# Altium footprint library CustomCase.PcbLib: 411 footprints (part 3 of 26)
Each footprint in its own frame and in the unit in brackets; x right, y up, seen from the top. Pads: shape width x height; smd on the part's side, far side on the other; paste and mask are expansions set on the pad; w line width, h text height; cw(c..) or ccw(c..) is an arc to the next point about the centre after c.
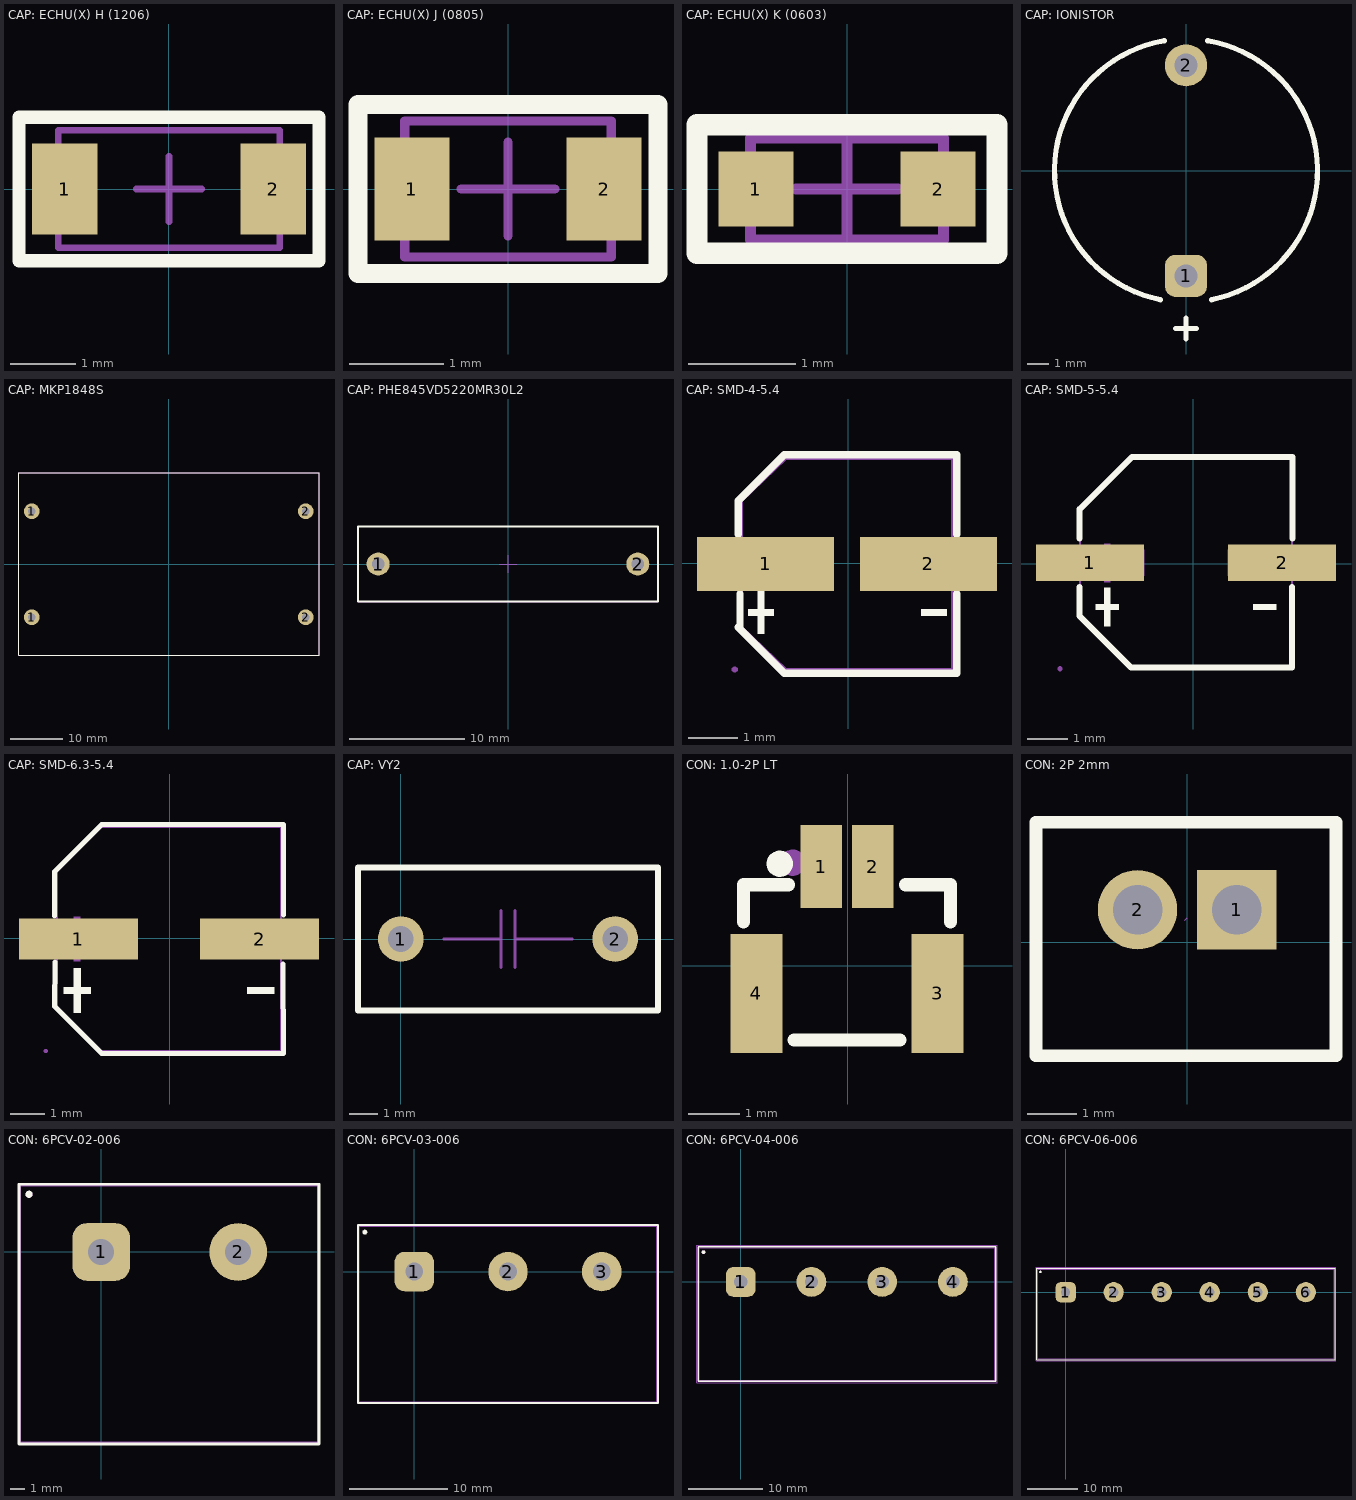
[diagram p2: the footprints below, top view; thin cyan lines are the x and y axes]

## CAP: ECHU(X) H (1206) [mm]
height 1.5
pads (2):
  rect 1x1.4 smd: 1(-1.6,0) 2(1.6,0)
Top Overlay:
  lines w0.2: -2.3,-1.1 -2.3,1.1 2.3,1.1 2.3,-1.1 -2.3,-1.1
Top Assy:
  lines w0.1: -1.7,-0.9 -1.7,0.9 1.7,0.9 1.7,-0.9 -1.7,-0.9
Size Area:
  lines w0.1: -0.5,0 0.5,0 ; 0,-0.5 0,0.5 ; -2.3,-1.1 -2.3,1.1 2.3,1.1 2.3,-1.1 -2.3,-1.1
3D body: height 1.5, standoff 0, extent -1.05,-0.9 1.05,0.9
3D body: height 1.5, standoff 0, extent -1.7,-0.9 -1.05,0.9
3D body: height 1.5, standoff 0, extent 1.05,-0.9 1.7,0.9

## CAP: ECHU(X) J (0805) [mm]
height 1.1
pads (2):
  rect 0.8x1.1 smd: 1(-1.025,0) 2(1.025,0)
Top Overlay:
  lines w0.2: -1.6,-0.9 -1.6,0.9 1.6,0.9 1.6,-0.9 -1.6,-0.9
Top Assy:
  lines w0.1: -1.1,-0.725 1.1,-0.725 1.1,0.725 -1.1,0.725 -1.1,-0.725
Size Area:
  lines w0.1: -0.5,0 0.5,0 ; 0,-0.5 0,0.5 ; -1.6,-0.9 1.6,-0.9 1.6,0.9 -1.6,0.9 -1.6,-0.9
3D body: height 1.1, standoff 0, extent 0.67,-0.725 1.1,0.725
3D body: height 1.1, standoff 0, extent -1.1,-0.725 -0.67,0.725
3D body: height 1.1, standoff 0, extent -0.67,-0.725 0.67,0.725

## CAP: ECHU(X) K (0603) [mm]
height 0.7
pads (2):
  rect 0.7x0.7 smd: 1(-0.85,0) 2(0.85,0)
Top Overlay:
  lines w0.2: -1.4,-0.6 1.4,-0.6 1.4,0.6 -1.4,0.6 -1.4,-0.6
Top Assy:
  lines w0.1: -0.9,-0.475 -0.9,0.475 0.9,0.475 0.9,-0.475 -0.9,-0.475
Size Area:
  lines w0.1: -0.475,0 0.475,0 ; 0,-0.475 0,0.475 ; -1.4,-0.6 -1.4,0.6 1.4,0.6 1.4,-0.6 -1.4,-0.6
3D body: height 0.7, standoff 0, extent -0.55,-0.475 0.55,0.475
3D body: height 0.7, standoff 0, extent -0.9,-0.475 -0.55,0.475
3D body: height 0.7, standoff 0, extent 0.55,-0.475 0.9,0.475

## CAP: IONISTOR [mm]
pads (2):
  rrect50% 2x2 hole 1.1: 1(0,-5)
  round 2 hole 1.1: 2(0,5)
Top Overlay:
  lines w0.25: -1.206,-6.132 cw(c0,0) -1.027,6.165 ; -0.5,-7.5 0.5,-7.5 ; 0,-8 0,-7 ; 1.027,6.165 cw(c0,0) 1.206,-6.132
3D body "eecs0hd334h.STEP": height 5.42, standoff -1.07, extent -5.25,-5.25 5.25,5.711

## CAP: MKP1848S [mm]
pads (4):
  round 3 hole 1.4: 1(-26.3,-10.2) 1(-26.3,10.1) 2(26.2,-10.2) 2(26.2,10.1)
Top Overlay:
  lines w0.2: -28.75,-17.5 28.75,-17.5 28.75,17.5 -28.75,17.5 -28.75,-17.5
Top Assy:
  lines w0.1: -28.75,-17.5 28.75,-17.5 28.75,17.5 -28.75,17.5 -28.75,-17.5
Size Area:
  lines w0.1: -28.75,-17.5 28.75,-17.5 28.75,17.5 -28.75,17.5 -28.75,-17.5
3D body "mkp18film.STEP": height 18.2, standoff -5.8, extent -28.75,-17.5 28.75,17.5

## CAP: PHE845VD5220MR30L2 [mm]
pads (2):
  round 2 hole 1.1: 1(-11.25,-0.003) 2(11.25,-0.003)
Top Overlay:
  lines w0.2: -13,-3.253 -13,3.253 13,3.253 13,-3.253 -13,-3.253
Top Assy:
  lines w0.1: -13,-3.253 13,-3.253 13,3.253 -13,3.253 -13,-3.253
Size Area:
  lines w0.1: -0.75,-0.003 0.75,-0.003 ; 0,-0.75 0,0.75 ; -13,-3.253 13,-3.253 13,3.253 -13,3.253 -13,-3.253
3D body "���.STEP": height 14.55, standoff -3.95, extent -13,-3.253 13,3.253

## CAP: SMD-4-5.4 [mm]
pads (2):
  rect 2.8x1.1 smd paste+0 mask+0.051: 1(-1.683,-0.011) 2(1.638,-0.011)
Top Overlay:
  region: 2.008,-0.936 2.008,-1.065 1.492,-1.065 1.492,-0.936
  region: -2.034,-0.936 -2.034,-1.065 -1.518,-1.065 -1.518,-0.936
  region: -1.84,-0.57 -1.84,-1.43 -1.711,-1.43 -1.711,-0.57
  lines w0.152: -2.239,-1.301 -1.303,-2.237 2.214,-2.237 2.214,-0.619 ; -2.239,0.596 -2.239,1.279 -1.303,2.215 2.214,2.215 2.214,0.596 ; -2.205,-1.301 -2.205,-0.619
Mechanical 6:
  region: 2.008,0.053 2.008,-0.076 1.492,-0.076 1.492,0.053
  region: -2.034,0.053 -2.034,-0.076 -1.518,-0.076 -1.518,0.053
  region: -1.84,0.419 -1.84,-0.441 -1.711,-0.441 -1.711,0.419
Size Area:
  region: -2.253,-2.161 -2.254,-2.137 -2.288,-2.104 -2.337,-2.104 -2.371,-2.137 -2.372,-2.161 -2.371,-2.185 -2.337,-2.219 -2.288,-2.219 -2.254,-2.185
  region: 2.287,0.314 2.287,-0.336 0.487,-0.336 0.487,0.314
  region: -2.313,0.314 -2.313,-0.336 -0.513,-0.336 -0.513,0.314
  lines w0.051: -2.172,-1.292 -1.27,-2.161 2.128,-2.161 2.128,2.139 -1.27,2.139 -2.172,1.27 -2.172,-1.292
3D body "CAP_SMD-CEL4D43S54H.step": height 5.38, standoff -0.02, extent -2.279,-2.161 2.321,2.139

## CAP: SMD-5-5.4 [mm]
pads (2):
  rect 2.7x0.91 smd paste+0 mask+0.051: 1(-2.587,0.018) 2(2.213,0.018)
Top Overlay:
  region: -2.227,-0.606 -2.227,-1.566 -2.083,-1.566 -2.083,-0.606
  region: -2.443,-1.014 -2.443,-1.158 -1.867,-1.158 -1.867,-1.014
  region: 2.069,-1.014 2.069,-1.158 1.493,-1.158 1.493,-1.014
  lines w0.152: -2.846,-0.589 -2.846,-1.313 -1.559,-2.601 2.462,-2.601 2.462,-0.589 ; -2.846,0.625 -2.846,1.359 -1.536,2.667 2.472,2.667 2.472,0.625
Mechanical 6:
  region: -2.227,0.498 -2.227,-0.462 -2.083,-0.462 -2.083,0.498
  region: -2.443,0.09 -2.443,-0.054 -1.867,-0.054 -1.867,0.09
  region: 2.069,0.09 2.069,-0.054 1.493,-0.054 1.493,0.09
Size Area:
  region: 2.963,-0.307 0.863,-0.307 0.863,0.343 2.963,0.343
  region: -3.337,0.343 -1.237,0.343 -1.237,-0.307 -3.337,-0.307
  region: -3.277,-2.632 -3.277,-2.608 -3.312,-2.574 -3.361,-2.574 -3.396,-2.608 -3.397,-2.632 -3.396,-2.656 -3.361,-2.691 -3.312,-2.69 -3.277,-2.656
  lines w0.051: -2.837,-1.332 -2.837,1.368 -1.537,2.668 2.463,2.668 2.463,-2.632 -1.537,-2.632 -2.837,-1.332
3D body "CAP_SMD-CEL5D53S54H.step": height 5.38, standoff -0.02, extent -3.125,-2.632 2.775,2.668

## CAP: SMD-6.3-5.4 [mm]
pads (2):
  rect 3.5x1.2 smd paste+0 mask+0.051: 1(-2.694,-0.025) 2(2.646,-0.025)
Top Overlay:
  region: -2.829,-0.883 -2.829,-2.203 -2.631,-2.203 -2.631,-0.883
  region: -3.126,-1.444 -3.126,-1.642 -2.334,-1.642 -2.334,-1.444
  region: 3.078,-1.444 3.078,-1.642 2.286,-1.642 2.286,-1.444
  lines w0.152: -3.4,0.661 -3.4,1.955 -2.004,3.351 3.352,3.351 3.345,0.683 ; -3.387,-0.711 -3.4,-2.006 -2.005,-3.401 3.351,-3.401 3.331,-0.764
Mechanical 6:
  region: -2.834,0.635 -2.834,-0.685 -2.636,-0.685 -2.636,0.635
  region: -3.126,0.074 -3.126,-0.124 -2.334,-0.124 -2.334,0.074
  region: 3.078,0.074 3.078,-0.124 2.286,-0.124 2.286,0.074
Size Area:
  region: -3.658,0.3 -1.058,0.3 -1.058,-0.35 -3.658,-0.35
  region: 1.042,0.3 3.642,0.3 3.642,-0.35 1.042,-0.35
  region: -3.598,-3.325 -3.599,-3.301 -3.634,-3.267 -3.682,-3.267 -3.717,-3.301 -3.718,-3.325 -3.717,-3.349 -3.682,-3.383 -3.634,-3.383 -3.599,-3.349
  lines w0.051: -3.324,-2.005 -3.324,1.955 -2.004,3.275 3.276,3.275 3.276,-3.325 -2.004,-3.325 -3.324,-2.005
3D body "CAP_SMD-CEL63D66S54H.step": height 5.38, standoff -0.02, extent -3.525,-3.3 3.475,3.3

## CAP: VY2 [mm]
pads (2):
  round 1.6 hole 0.9: 1(0,0) 2(7.5,0)
Top Overlay:
  lines w0.2: 9,-2.5 9,2.5 -1.5,2.5 -1.5,-2.5 9,-2.5 ; 9,-2.5 9,-2.5
Top Assy:
  lines w0.1: 1.5,0 3.5,0 3.5,1 3.5,-1 ; 4,-1 4,1 4,0 6,0 ; -1.5,-2.5 -1.5,2.5 9,2.5 9,-2.5 -1.5,-2.5
Size Area:
  lines w0.1: -1.5,-2.5 -1.5,2.5 9,2.5 9,-2.5 -1.5,-2.5 ; -1.5,-2.5 -1.5,-2.5
3D body "777.STEP": height 14.75, standoff -1.75, extent -1.5,-2.5 9,2.5

## CON: 1.0-2P LT [mm]
pads (4):
  rect 0.8x1.6 smd: 1(-0.515,1.92) 2(0.485,1.92)
  rect 1x2.3 smd: 3(1.735,-0.53) 4(-1.765,-0.53)
Top Overlay:
  circle w0.254: c-1.315,1.975 r0.127
  lines w0.254: -2.015,0.851 -2.015,1.57 -1.146,1.57 ; -1.034,-1.43 1.004,-1.43 ; 1.116,1.57 1.985,1.57 1.985,0.851
Size Area:
  circle w0.254: c-1.065,1.995 r0.127
3D body: height 4.4, standoff 0, extent -2,-1.525 2,1.625

## CON: 2P 2mm [mm]
pads (2):
  rect 1.6x1.6 hole 1: 1(1.001,0.658)
  round 1.6 hole 1: 2(-1.001,0.658)
Top Overlay:
  lines w0.254: -3.048,2.418 -3.048,-2.282 2.952,-2.282 ; -3,2.418 3,2.418 3,-2.282
Size Area:
  lines w0.003: -0.049,0.446 0.002,0.497
3D body "B2B-PH_2mm_2way.step": height 6, standoff -3.4, extent -2.975,-2.1 2.925,2.4

## CON: 6PCV-02-006 [mm]
pads (4):
  rrect50% 4x4 hole 1.8: 1(0,0)
  round 4 hole 1.8: 2(9.5,0)
  round 0.5 on Mech1: ""(-5,4)
  round 0.5 on Top Overlay: ""(-5,4)
Top Overlay:
  lines w0.2: -5.7,-13.3 15.1,-13.3 15.1,4.7 -5.7,4.7 -5.7,-13.3
Top Assy:
  lines w0.1: -5.6,-13.2 15,-13.2 15,4.58 -5.6,4.58 -5.6,-13.2
  text "1" at -0.2,-3.6 h2
  text "2" at 9.2,-3.6 h2
Size Area:
  lines w0.1: -5.7,-13.3 -5.7,4.7 15.1,4.7 15.1,-13.3 -5.7,-13.3
3D body "02.STEP": height 15.96, standoff -4.99, extent -5.6,-13.2 15,4.58

## CON: 6PCV-03-006 [mm]
pads (4):
  rrect50% 4x4 hole 1.8: 1(0,0)
  round 4 hole 1.8: 2(9.5,0) 3(19,0)
  round 0.5 on Top Overlay: ""(-5,4)
Top Overlay:
  lines w0.2: -5.7,-13.3 24.7,-13.3 24.7,4.7 -5.7,4.7 -5.7,-13.3
Top Assy:
  lines w0.1: -5.562,-13.2 24.562,-13.2 24.562,4.58 -5.562,4.58 -5.562,-13.2
  text "3" at 18.8,-3.6 h2
  text "2" at 9.2,-3.6 h2
  text "1" at -0.2,-3.6 h2
Size Area:
  lines w0.1: -5.675,-13.3 24.675,-13.3 24.675,4.675 -5.675,4.675 -5.675,-13.3
3D body "03.STEP": height 15.96, standoff -4.99, extent -5.562,-13.2 24.562,4.58

## CON: 6PCV-04-006 [mm]
pads (6):
  rrect50% 4x4 hole 1.8: 1(0,0)
  round 4 hole 1.8: 2(9.5,0) 3(19,0) 4(28.5,0)
  round 0.5 on Mech1: ""(-5,4)
  round 0.5 on Top Overlay: ""(-5,4)
Top Overlay:
  lines w0.2: -5.7,-13.35 -5.7,4.725 34.25,4.725 34.25,-13.35 -5.7,-13.35
Top Assy:
  lines w0.1: -5.55,-13.2 -5.55,4.58 34.1,4.58 34.1,-13.2 -5.55,-13.2
  text "1" at -0.2,-3.6 h2
  text "2" at 9.2,-3.6 h2
  text "3" at 18.8,-3.6 h2
  text "4" at 28.2,-3.6 h2
Size Area:
  lines w0.1: -5.875,-13.525 -5.875,4.9 34.425,4.9 34.425,-13.525 -5.875,-13.525
3D body "6pcv-04-006.STEP": height 15.96, standoff -4.99, extent -5.525,-13.18 34.125,4.6

## CON: 6PCV-06-006 [mm]
pads (8):
  rrect50% 4x4 hole 1.8: 1(0,0)
  round 4 hole 1.8: 2(9.5,0) 3(19,0) 4(28.5,0) 5(38,0) 6(47.5,0)
  round 0.5 on Mech1: ""(-5,4)
  round 0.5 on Top Overlay: ""(-5,4)
Top Overlay:
  lines w0.2: -5.7,-13.35 53.3,-13.35 53.3,4.725 -5.7,4.725 -5.7,-13.35
Top Assy:
  lines w0.1: -5.55,-13.2 53.15,-13.2 53.15,4.58 -5.55,4.58 -5.55,-13.2
  text "6" at 47.2,-3.5 h2
  text "5" at 37.7,-3.6 h2
  text "4" at 28.2,-3.6 h2
  text "3" at 18.8,-3.6 h2
  text "2" at 9.2,-3.6 h2
  text "1" at -0.2,-3.6 h2
Size Area:
  lines w0.1: -5.875,-13.525 53.475,-13.525 53.475,4.9 -5.875,4.9 -5.875,-13.525
3D body "6pcv-06-006.STEP": height 15.96, standoff -4.99, extent -5.55,-13.2 53.15,4.58